# Altium footprint library PCB_ConnectorHDR.PcbLib: 139 footprints (part 8 of 9)
Each footprint in its own frame and in the unit in brackets; x right, y up, seen from the top. Pads: shape width x height; smd on the part's side, far side on the other; paste and mask are expansions set on the pad; w line width, h text height; cw(c..) or ccw(c..) is an arc to the next point about the centre after c.
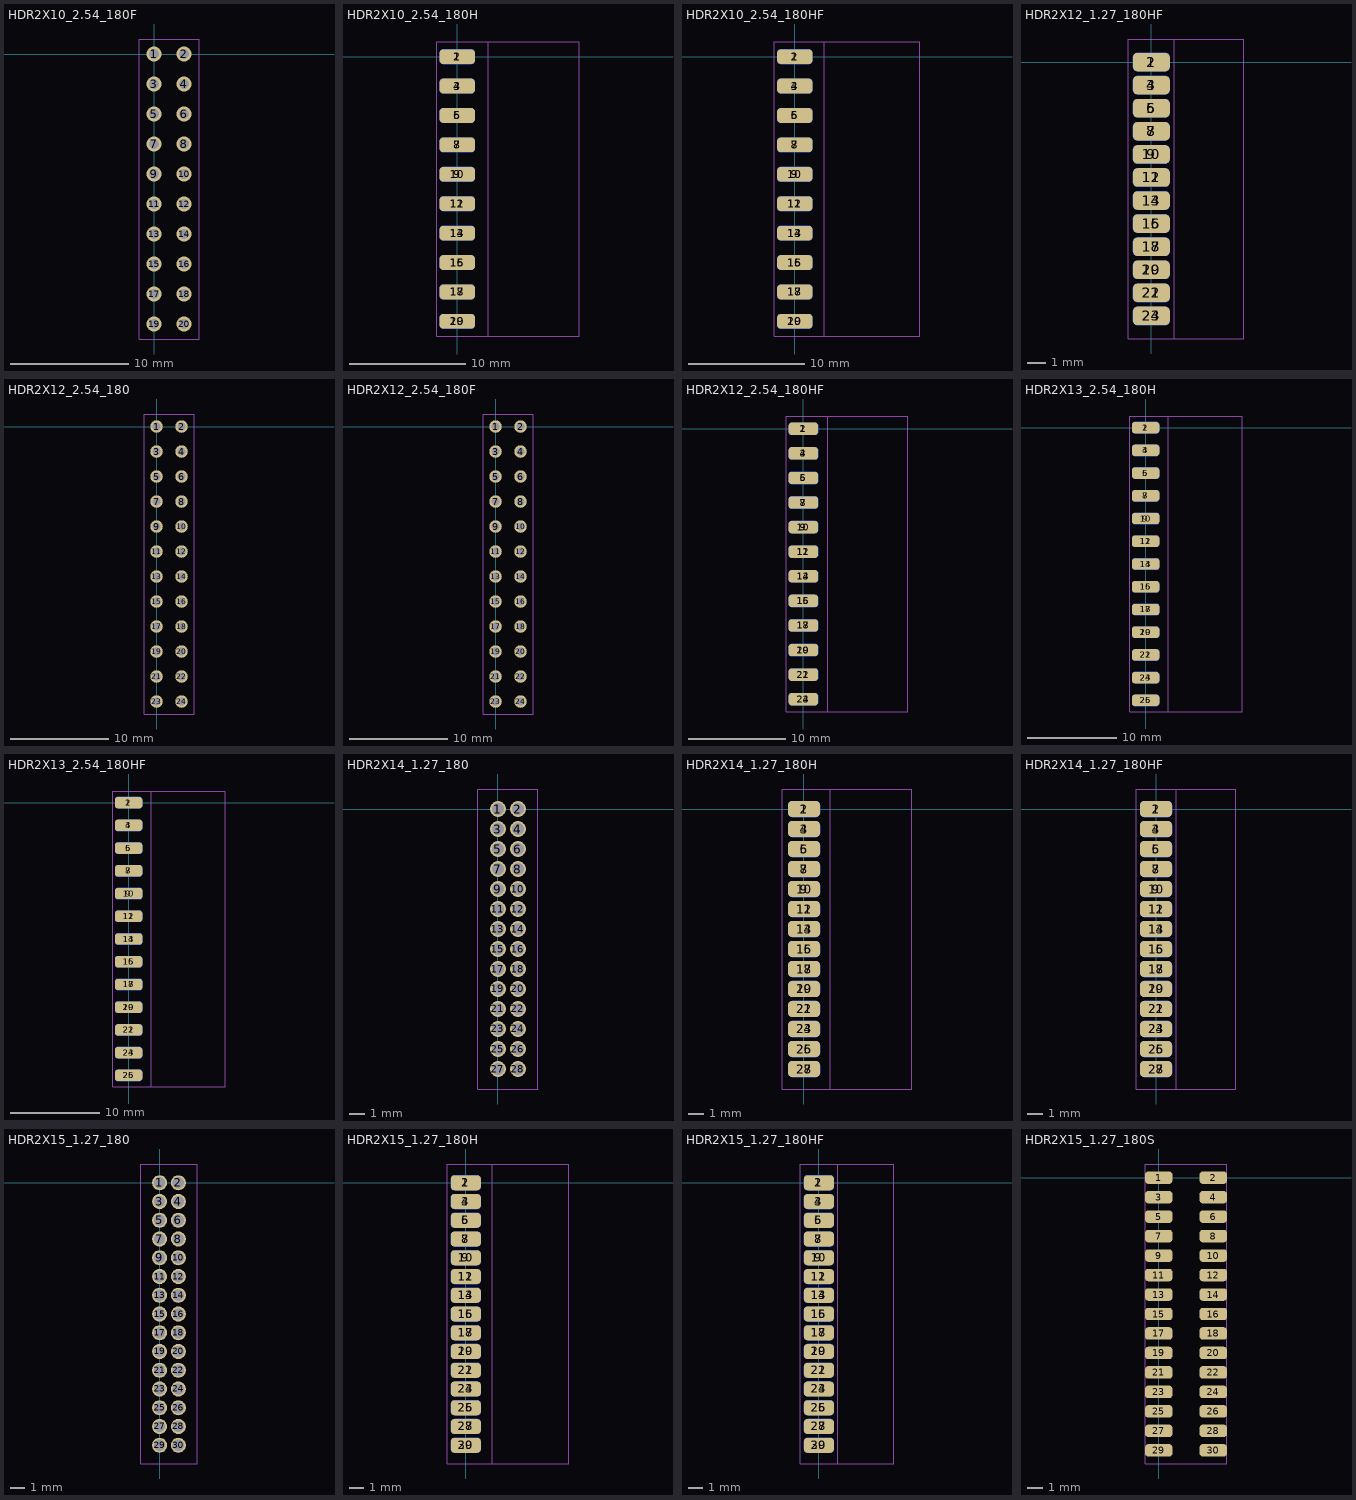
[diagram p7: the footprints below, top view; thin cyan lines are the x and y axes]

## HDR2X10_2.54_180F [mil]
height 169.29
pads (20):
  round 50 hole 32: 1(0,0) 2(100,0) 3(0,-100) 4(100,-100) 5(0,-200) 6(100,-200) 7(0,-300) 8(100,-300) 9(0,-400) 10(100,-400) 11(0,-500) 12(100,-500) 13(0,-600) 14(100,-600) 15(0,-700) 16(100,-700) 17(0,-800) 18(100,-800) 19(0,-900) 20(100,-900)
Mechanical 13:
  lines w2: -50,-950 150,-950 150,50 -50,50 -50,-950
T-Component:
  lines w2: -50,-950 150,-950 150,50 -50,50 -50,-950
  text ".Designator" at 19,-470 h80
3D body "female_header_a-bl254-dg-g20d.stp": height 334.65, standoff -125.98, extent -48.42,-954.92 148.43,54.92

## HDR2X10_2.54_180H [mil]
height 169.29
pads (20):
  rrect50% 120x50 smd: 1(0,0) 3(0,-100) 5(0,-200) 7(0,-300) 9(0,-400) 11(0,-500) 13(0,-600) 15(0,-700) 17(0,-800) 19(0,-900)
  rrect50% 120x50 smd far side: 2(0,0) 4(0,-100) 6(0,-200) 8(0,-300) 10(0,-400) 12(0,-500) 14(0,-600) 16(0,-700) 18(0,-800) 20(0,-900)
Mechanical 13:
  lines w2: -70,-950 415,-950 415,50 -70,50 -70,-950
T-Component:
  lines w2: -70,-950 105,-950 105,50 -70,50 -70,-950
  text ".Designator" at -31,-470 h80
B-Component:
  lines w2: -70,-950 -70,50 105,50 105,-950 -70,-950
3D body "pin_header_awl254-dg-g20d.stp": height 100, standoff -100, extent -37.76,-950 415,50

## HDR2X10_2.54_180HF [mil]
height 169.29
pads (20):
  rrect50% 120x50 smd: 1(0,0) 3(0,-100) 5(0,-200) 7(0,-300) 9(0,-400) 11(0,-500) 13(0,-600) 15(0,-700) 17(0,-800) 19(0,-900)
  rrect50% 120x50 smd far side: 2(0,0) 4(0,-100) 6(0,-200) 8(0,-300) 10(0,-400) 12(0,-500) 14(0,-600) 16(0,-700) 18(0,-800) 20(0,-900)
Mechanical 13:
  lines w2: -70,-950 425,-950 425,50 -70,50 -70,-950
T-Component:
  lines w2: -70,-950 100,-950 100,50 -70,50 -70,-950
  text ".Designator" at -31,-470 h80
B-Component:
  lines w2: -70,-950 -70,50 100,50 100,-950 -70,-950
3D body "female_header_a-bl254-dg-g20d.stp": height 76.43, standoff -120.43, extent -40.98,-954.92 419.65,54.92

## HDR2X12_1.27_180HF [mil]
height 169.29
pads (24):
  rrect50% 80x40 smd: 1(0,0) 3(0,-50) 5(0,-100) 7(0,-150) 9(0,-200) 11(0,-250) 13(0,-300) 15(0,-350) 17(0,-400) 19(0,-450) 21(0,-500) 23(0,-550)
  rrect50% 80x40 smd far side: 2(0,0) 4(0,-50) 6(0,-100) 8(0,-150) 10(0,-200) 12(0,-250) 14(0,-300) 16(0,-350) 18(0,-400) 20(0,-450) 22(0,-500) 24(0,-550)
Mechanical 13:
  lines w2: -50,-600 200,-600 200,50 -50,50 -50,-600
T-Component:
  lines w2: -50,-600 50,-600 50,50 -50,50 -50,-600
  text ".Designator" at -31,-295 h80
3D body "female_header_a-bl127-dg-g24d.stp": height 39.02, standoff -83.02, extent -28.34,-582.88 200,32.87

## HDR2X12_2.54_180 [mil]
height 169.29
pads (24):
  round 50 hole 32: 1(0,0) 2(100,0) 3(0,-100) 4(100,-100) 5(0,-200) 6(100,-200) 7(0,-300) 8(100,-300) 9(0,-400) 10(100,-400) 11(0,-500) 12(100,-500) 13(0,-600) 14(100,-600) 15(0,-700) 16(100,-700) 17(0,-800) 18(100,-800) 19(0,-900) 20(100,-900) 21(0,-1000) 22(100,-1000) 23(0,-1100) 24(100,-1100)
Mechanical 13:
  lines w2: -50,-1150 150,-1150 150,50 -50,50 -50,-1150
T-Component:
  lines w2: -50,-1150 -50,50 150,50 150,-1150 -50,-1150
  text ".Designator" at 19,-570 h80
3D body "pin_header_awl254-dg-g24d.stp": height 334.65, standoff -118.11, extent -50,-1149.99 150,50.01

## HDR2X12_2.54_180F [mil]
height 169.29
pads (24):
  round 50 hole 32: 1(0,0) 2(100,0) 3(0,-100) 4(100,-100) 5(0,-200) 6(100,-200) 7(0,-300) 8(100,-300) 9(0,-400) 10(100,-400) 11(0,-500) 12(100,-500) 13(0,-600) 14(100,-600) 15(0,-700) 16(100,-700) 17(0,-800) 18(100,-800) 19(0,-900) 20(100,-900) 21(0,-1000) 22(100,-1000) 23(0,-1100) 24(100,-1100)
Mechanical 13:
  lines w2: -50,-1150 150,-1150 150,50 -50,50 -50,-1150
T-Component:
  lines w2: -50,-1150 -50,50 150,50 150,-1150 -50,-1150
  text ".Designator" at 19,-570 h80
3D body "female_header_a-bl254-dg-g24d.stp": height 334.65, standoff -125.98, extent -48.43,-1154.92 148.42,54.92

## HDR2X12_2.54_180HF [mil]
height 169.29
pads (24):
  rrect50% 120x50 smd: 1(0,0) 3(0,-100) 5(0,-200) 7(0,-300) 9(0,-400) 11(0,-500) 13(0,-600) 15(0,-700) 17(0,-800) 19(0,-900) 21(0,-1000) 23(0,-1100)
  rrect50% 120x50 smd far side: 2(0,0) 4(0,-100) 6(0,-200) 8(0,-300) 10(0,-400) 12(0,-500) 14(0,-600) 16(0,-700) 18(0,-800) 20(0,-900) 22(0,-1000) 24(0,-1100)
Mechanical 13:
  lines w2: -70,-1150 -70,50 425,50 425,-1150 -70,-1150
T-Component:
  lines w2: -70,-1150 -70,50 100,50 100,-1150 -70,-1150
  text ".Designator" at -31,-570 h80
B-Component:
  lines w2: -70,-1150 100,-1150 100,50 -70,50 -70,-1150
3D body "female_header_a-bl254-dg-g24d.stp": height 76.43, standoff -120.43, extent -35.97,-1154.92 424.66,54.92

## HDR2X13_2.54_180H [mil]
height 169.29
pads (26):
  rrect50% 120x50 smd: 1(0,0) 3(0,-100) 5(0,-200) 7(0,-300) 9(0,-400) 11(0,-500) 13(0,-600) 15(0,-700) 17(0,-800) 19(0,-900) 21(0,-1000) 23(0,-1100) 25(0,-1200)
  rrect50% 120x50 smd far side: 2(0,0) 4(0,-100) 6(0,-200) 8(0,-300) 10(0,-400) 12(0,-500) 14(0,-600) 16(0,-700) 18(0,-800) 20(0,-900) 22(0,-1000) 24(0,-1100) 26(0,-1200)
Mechanical 13:
  lines w2: -70,-1250 425,-1250 425,50 -70,50 -70,-1250
T-Component:
  lines w2: -70,-1250 100,-1250 100,50 -70,50 -70,-1250
  text ".Designator" at -31,-620 h80
B-Component:
  lines w2: -70,-1250 100,-1250 100,50 -70,50 -70,-1250
3D body "pin_header_awl254-dg-g26d.stp": height 100, standoff -100, extent -36.38,-1250 416.38,50

## HDR2X13_2.54_180HF [mil]
height 169.29
pads (26):
  rrect50% 120x50 smd: 1(0,0) 3(0,-100) 5(0,-200) 7(0,-300) 9(0,-400) 11(0,-500) 13(0,-600) 15(0,-700) 17(0,-800) 19(0,-900) 21(0,-1000) 23(0,-1100) 25(0,-1200)
  rrect50% 120x50 smd far side: 2(0,0) 4(0,-100) 6(0,-200) 8(0,-300) 10(0,-400) 12(0,-500) 14(0,-600) 16(0,-700) 18(0,-800) 20(0,-900) 22(0,-1000) 24(0,-1100) 26(0,-1200)
Mechanical 13:
  lines w2: -70,-1250 -70,50 425,50 425,-1250 -70,-1250
T-Component:
  lines w2: -70,-1250 -70,50 100,50 100,-1250 -70,-1250
  text ".Designator" at -31,-620 h80
B-Component:
  lines w2: -70,-1250 -70,50 100,50 100,-1250 -70,-1250
3D body "female_header_a-bl254-dg-g26d.stp": height 76.43, standoff -120.43, extent -35.98,-1254.92 424.65,54.92

## HDR2X14_1.27_180 [mil]
height 169.29
pads (28):
  round 40 hole 30: 1(0,0) 2(50,0) 3(0,-50) 4(50,-50) 5(0,-100) 6(50,-100) 7(0,-150) 8(50,-150) 9(0,-200) 10(50,-200) 11(0,-250) 12(50,-250) 13(0,-300) 14(50,-300) 15(0,-350) 16(50,-350) 17(0,-400) 18(50,-400) 19(0,-450) 20(50,-450) 21(0,-500) 22(50,-500) 23(0,-550) 24(50,-550) 25(0,-600) 26(50,-600) 27(0,-650) 28(50,-650)
Mechanical 13:
  lines w2: -50,-700 -50,50 100,50 100,-700 -50,-700
T-Component:
  lines w2: -50,-700 -50,50 100,50 100,-700 -50,-700
  text ".Designator" at -6,-345 h80
3D body "pin_header_a-sl127-dg-g28d.stp": height 210.24, standoff -102.36, extent -73.42,-674.99 123.43,25.01

## HDR2X14_1.27_180H [mil]
height 169.29
pads (28):
  rrect50% 80x40 smd: 1(0,0) 3(0,-50) 5(0,-100) 7(0,-150) 9(0,-200) 11(0,-250) 13(0,-300) 15(0,-350) 17(0,-400) 19(0,-450) 21(0,-500) 23(0,-550) 25(0,-600) 27(0,-650)
  rrect50% 80x40 smd far side: 2(0,0) 4(0,-50) 6(0,-100) 8(0,-150) 10(0,-200) 12(0,-250) 14(0,-300) 16(0,-350) 18(0,-400) 20(0,-450) 22(0,-500) 24(0,-550) 26(0,-600) 28(0,-650)
Mechanical 13:
  lines w2: -55,-700 -55,50 270,50 270,-700 -55,-700
T-Component:
  lines w2: -55,-700 -55,50 65,50 65,-700 -55,-700
  text ".Designator" at -31,-345 h80
3D body "pin_header_a-sl127-dg-g28d.stp": height 76.43, standoff -120.43, extent -41.22,-675 271.38,25

## HDR2X14_1.27_180HF [mil]
height 169.29
pads (28):
  rrect50% 80x40 smd: 1(0,0) 3(0,-50) 5(0,-100) 7(0,-150) 9(0,-200) 11(0,-250) 13(0,-300) 15(0,-350) 17(0,-400) 19(0,-450) 21(0,-500) 23(0,-550) 25(0,-600) 27(0,-650)
  rrect50% 80x40 smd far side: 2(0,0) 4(0,-50) 6(0,-100) 8(0,-150) 10(0,-200) 12(0,-250) 14(0,-300) 16(0,-350) 18(0,-400) 20(0,-450) 22(0,-500) 24(0,-550) 26(0,-600) 28(0,-650)
Mechanical 13:
  lines w2: -50,-700 200,-700 200,50 -50,50 -50,-700
T-Component:
  lines w2: -50,-700 50,-700 50,50 -50,50 -50,-700
  text ".Designator" at -31,-345 h80
3D body "female_header_a-bl127-dg-g28d.stp": height 40.02, standoff -82.02, extent -28.34,-682.88 200.01,32.87

## HDR2X15_1.27_180 [mil]
height 169.29
pads (30):
  round 40 hole 30: 1(0,0) 2(50,0) 3(0,-50) 4(50,-50) 5(0,-100) 6(50,-100) 7(0,-150) 8(50,-150) 9(0,-200) 10(50,-200) 11(0,-250) 12(50,-250) 13(0,-300) 14(50,-300) 15(0,-350) 16(50,-350) 17(0,-400) 18(50,-400) 19(0,-450) 20(50,-450) 21(0,-500) 22(50,-500) 23(0,-550) 24(50,-550) 25(0,-600) 26(50,-600) 27(0,-650) 28(50,-650) 29(0,-700) 30(50,-700)
Mechanical 13:
  lines w2: -50,-750 100,-750 100,50 -50,50 -50,-750
T-Component:
  lines w2: -50,-750 100,-750 100,50 -50,50 -50,-750
  text ".Designator" at -6,-395 h80
3D body "pin_header_a-sl127-dg-g30d.stp": height 210.24, standoff -102.36, extent -73.43,-724.99 123.42,25

## HDR2X15_1.27_180H [mil]
height 169.29
pads (30):
  rrect50% 80x40 smd: 1(0,0) 3(0,-50) 5(0,-100) 7(0,-150) 9(0,-200) 11(0,-250) 13(0,-300) 15(0,-350) 17(0,-400) 19(0,-450) 21(0,-500) 23(0,-550) 25(0,-600) 27(0,-650) 29(0,-700)
  rrect50% 80x40 smd far side: 2(0,0) 4(0,-50) 6(0,-100) 8(0,-150) 10(0,-200) 12(0,-250) 14(0,-300) 16(0,-350) 18(0,-400) 20(0,-450) 22(0,-500) 24(0,-550) 26(0,-600) 28(0,-650) 30(0,-700)
Mechanical 13:
  lines w2: -50,-750 275,-750 275,50 -50,50 -50,-750
T-Component:
  lines w2: -50,-750 70,-750 70,50 -50,50 -50,-750
  text ".Designator" at -26,-370 h80
3D body "pin_header_a-sl127-dg-g30d.stp": height 76.43, standoff -120.43, extent -36.22,-724.99 276.38,25

## HDR2X15_1.27_180HF [mil]
height 169.29
pads (30):
  rrect50% 80x40 smd: 1(0,0) 3(0,-50) 5(0,-100) 7(0,-150) 9(0,-200) 11(0,-250) 13(0,-300) 15(0,-350) 17(0,-400) 19(0,-450) 21(0,-500) 23(0,-550) 25(0,-600) 27(0,-650) 29(0,-700)
  rrect50% 80x40 smd far side: 2(0,0) 4(0,-50) 6(0,-100) 8(0,-150) 10(0,-200) 12(0,-250) 14(0,-300) 16(0,-350) 18(0,-400) 20(0,-450) 22(0,-500) 24(0,-550) 26(0,-600) 28(0,-650) 30(0,-700)
Mechanical 13:
  lines w2: -50,-750 200,-750 200,50 -50,50 -50,-750
T-Component:
  lines w2: -50,-750 50,-750 50,50 -50,50 -50,-750
  text ".Designator" at -31,-370 h80
3D body "female_header_a-bl127-dg-g30d.stp": height 40.02, standoff -82.02, extent -28.34,-732.88 200.01,32.87

## HDR2X15_1.27_180S [mil]
height 169.29
pads (30):
  rrect50% 70x32 smd: 1(0,0) 2(140,0) 3(0,-50) 4(140,-50) 5(0,-100) 6(140,-100) 7(0,-150) 8(140,-150) 9(0,-200) 10(140,-200) 11(0,-250) 12(140,-250) 13(0,-300) 14(140,-300) 15(0,-350) 16(140,-350) 17(0,-400) 18(140,-400) 19(0,-450) 20(140,-450) 21(0,-500) 22(140,-500) 23(0,-550) 24(140,-550) 25(0,-600) 26(140,-600) 27(0,-650) 28(140,-650) 29(0,-700) 30(140,-700)
Mechanical 13:
  lines w2: -35,-735 -35,35 175,35 175,-735 -35,-735
T-Component:
  lines w2: -35,-735 -35,35 175,35 175,-735 -35,-735
  text ".Designator" at 44,-370 h80
3D body "pin_header_a-sl127-dg-g30mp1.stp": height 252.13, standoff 0.25, extent -38.31,-725 178.31,25